# Altium footprint library KM_ALTIUM.PcbLib: 265 footprints (part 8 of 17)
Each footprint in its own frame and in the unit in brackets; x right, y up, seen from the top. Pads: shape width x height; smd on the part's side, far side on the other; paste and mask are expansions set on the pad; w line width, h text height; cw(c..) or ccw(c..) is an arc to the next point about the centre after c.
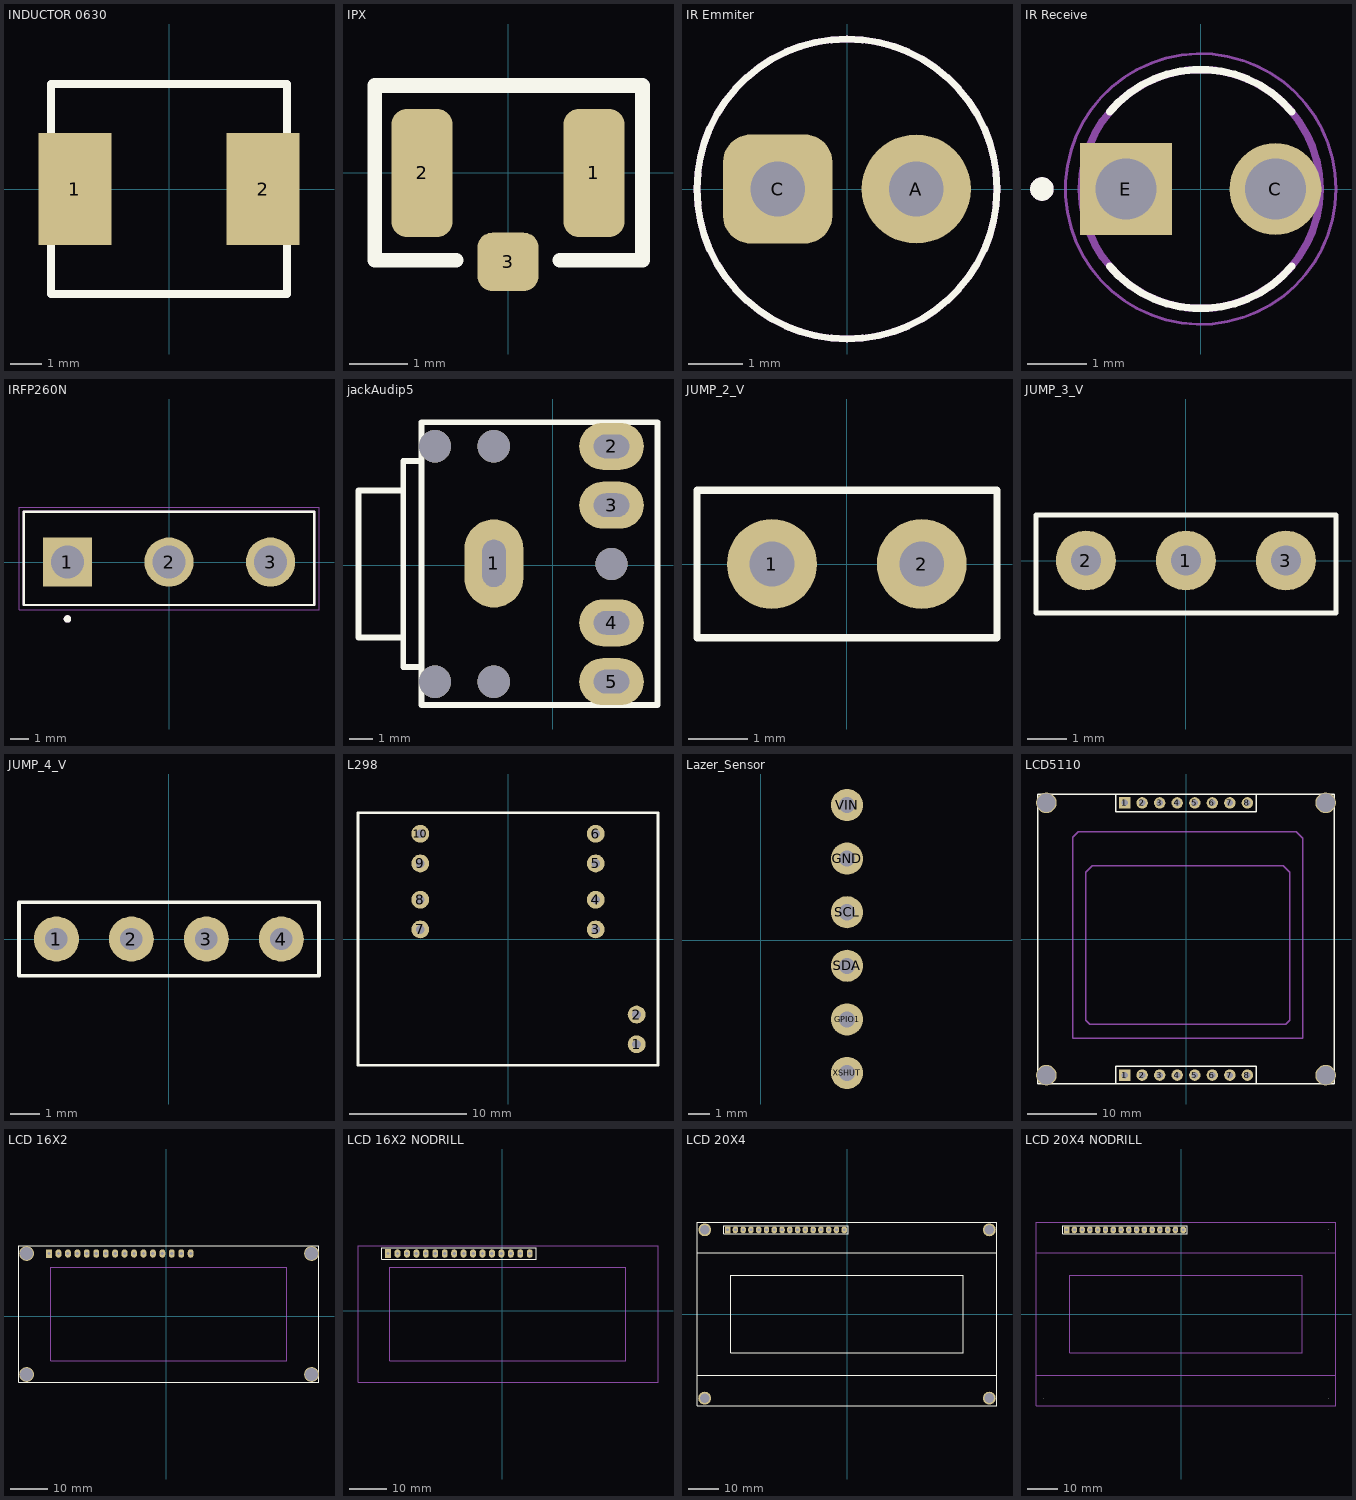
[diagram p7: the footprints below, top view; thin cyan lines are the x and y axes]

## INDUCTOR 0630 [mm]
pads (2):
  rect 2.35x3.6 smd: 1(-3.025,0) 2(3.025,0)
Top Overlay:
  lines w0.254: -3.8,-3.375 -3.8,3.375 3.8,3.375 3.8,-3.375 -3.8,-3.375
3D body "CIP0630.step": height 3.2, standoff 0, extent -3.8,-3.375 3.8,3.375

## IPX [mm]
pads (3):
  rrect50% 1.05x2.2 smd: 1(1.475,0) 2(-1.475,0)
  rrect50% 1.05x1 smd: 3(0,-1.525)
Top Overlay:
  lines w0.254: -0.889,-1.499 -2.286,-1.499 -2.286,1.5 2.311,1.5 2.311,-1.499 0.889,-1.499
3D body "User Library-20279-001.STEP": height 1.27, standoff 0.01, extent -1.5,-1.55 1.5,1.55

## IR Emmiter [mm] "3mm"
pads (2):
  round 2 hole 1 mask+0: A(1.27,0)
  rrect50% 2x2 hole 1 mask+0: C(-1.27,0)
Top Overlay:
  circle w0.127: c0,0 r2.75
Top Solder:
  circle w1: c1.27,0 r0.5
  circle w1: c-1.27,0 r0.5
Bottom Solder:
  circle w1: c1.27,0 r0.5
  circle w1: c-1.27,0 r0.5
Mechanical 13:
  circle w0.127: c0,0 r2.75
3D body "TSAL4400.STEP": height 6.1, standoff -28.8, extent -1.52,-1.587 1.52,1.587

## IR Receive [mm] "3mm"
pads (2):
  round 1.56 hole 1.04: C(1.27,0)
  rect 1.56x1.56 hole 1.04: E(-1.27,0)
Top Overlay:
  circle w0.2: c-2.7,0 r0.1
  lines w0.127: -1.55,-1.31 ccw(c0,-0.009) 1.55,-1.31 ; -1.55,1.31 cw(c0,0.009) 1.55,1.31
Mechanical 13:
  circle w0.2: c-2.7,0 r0.1
  circle w0.127: c0,0 r2.03
Mechanical 15:
  circle w0.05: c0,0 r2.3
3D body "TEFT4300--3DModel-STEP-269445.STEP": height 6.1, standoff -28.8, extent -1.473,-1.95 1.727,1.95

## IRFP260N [mm]
pads (3):
  rect 2.64x2.64 hole 1.76: 1(-5.45,0)
  round 2.64 hole 1.76: 2(0,0) 3(5.45,0)
Top Overlay:
  circle w0.2: c-5.45,-3.05 r0.1
  lines w0.127: -7.8,-2.3 7.8,-2.3 7.8,2.7 -7.8,2.7 -7.8,-2.3
Mechanical 13:
  circle w0.2: c-5.45,-3.05 r0.1
  lines w0.127: -7.8,-2.3 7.8,-2.3 7.8,2.7 -7.8,2.7 -7.8,-2.3
Mechanical 15:
  lines w0.05: -8.05,-2.55 8.05,-2.55 8.05,2.95 -8.05,2.95 -8.05,-2.55
3D body "step_temp.STEP": height 35.1, standoff 0, extent -7.8,-2.3 7.8,2.7

## jackAudip5 [mil]
pads (5):
  oval 100x150 hole 40 slot 80 at 90 deg: 1(-100,3)
  oval 110x80 hole 40 slot 60 at 0 deg: 2(100,202) 3(100,102) 4(100,-98) 5(100,-198)
via -100,202 diameter 55 hole 55
via -100,-198 diameter 55 hole 55
via 100,2 diameter 55 hole 55
via -200,202 diameter 55 hole 55
via -200,-198 diameter 55 hole 55
Top Overlay:
  lines w10: -330,127 -330,-123 -255,-123 ; -329,127 -256,127 -255,128 ; -225,176 -226,177 -254,177 -254,-173 -224,-173 ; -219,-238 178,-238 ; 178,242 178,-238 ; 178,-238 -223,-238 -223,243 178,243 178,-238
3D body "SW3dPS-CONNECTOR, PHONE JACK, STEREO, 3.5 MM, SEE-PLUS ST-3536-02HG.STEP": height 394.3, standoff -137.19, extent -353.56,-237 201.56,235.44

## JUMP_2_V [mil] "2.54"
pads (2):
  round 60 hole 30: 1(-50,0) 2(50,0)
Top Overlay:
  lines w4.92: -100,-49.21 -100,49.22 100.2,49.22 100.2,-49.21 -100,-49.21
3D body "1x2 Male Pin Header.STEP": height 414.96, standoff -118.11, extent -100,-49.21 100.2,49.22

## JUMP_3_V [mil] "2.54"
pads (3):
  round 60 hole 30: 1(0,0) 2(-100,0) 3(100,0)
Top Overlay:
  lines w4.92: -150,-52.71 150.2,-52.71 150.2,45.72 -150,45.72 -150,-52.71
3D body "1x3 Male Pin Header.STEP": height 414.96, standoff -118.11, extent -150,-52.71 150.2,45.72

## JUMP_4_V [mil] "2.54"
pads (4):
  round 60 hole 30: 1(-150,0) 2(-50,0) 3(50,0) 4(150,0)
Top Overlay:
  lines w4.92: -200,-49.21 200.2,-49.21 200.2,49.22 -200,49.22 -200,-49.21
3D body "1x4 Male Pin Header.STEP": height 414.96, standoff -118.11, extent -200,-49.21 200.2,49.22

## L298 [mil] "Module"
pads (10):
  round 60 hole 30: 1(433.07,-354.33) 2(433.07,-254.33) 3(295.28,32.28) 4(295.28,132.28) 5(295.28,254.33) 6(295.28,354.33) 7(-295.28,32.28) 8(-295.28,132.28) 9(-295.28,254.33) 10(-295.28,354.33)
Top Overlay:
  lines w10: -505,-425 505,-425 505,425 480,425 -505,425 -505,-425
3D body "MX1616 stepper driver .STEP": height 295.28, standoff -3.94, extent -492.13,-413.38 492.12,413.39

## Lazer_Sensor [mil] "VL53L0X (ToF-F) 940nm GY-VL53L0XV2 I2C"
pads (6):
  round 60 hole 30: GND(161.42,151.97) GPIO1(161.42,-148.03) SCL(161.42,51.97) SDA(161.42,-48.03) VIN(161.42,251.97) XSHUT(161.42,-248.03)
3D body "vl53l0x.stp": height 452.76, standoff 19.69, extent -98.43,-480.31 39.37,492.13
3D body "PinHeader_6X1_right.stp": height 190.94, standoff -142.52, extent -111.73,-298.03 171.73,301.97

## LCD5110 [mil]
pads (20):
  rect 65x65 hole 35.43: 1(-350,-777) 1(-350,777)
  round 65 hole 35.43: 2(-250,-777) 2(-250,777) 3(-150,-777) 3(-150,777) 4(-50,-777) 4(-50,777) 5(50,-777) 5(50,777) 6(150,-777) 6(150,777) 7(250,-777) 7(250,777) 8(350,-777) 8(350,777)
  round 118.11 hole 106.3: ""(-797,-777.01) ""(-797,777.01) ""(797,-777.01) ""(797,777.01)
Top Overlay:
  lines w7.87: -400,-827 400,-827 400,-727 -400,-727 -400,-827 ; -400,727 -400,827 400,827 400,727 -400,727
  lines w8: -846.46,-826.77 846.23,-826.77 ; -846.46,-826.32 -846.46,826.77 846.46,826.77 ; 0,-726 1,-727 ; 0,828 1,827 ; 846.46,-826.77 846.46,826.32
Mechanical 1:
  lines w8: -646,-567 665,-567 665,575 629,611 -615,611 -646,580 -646,-567
Mechanical 3:
  lines w8: -572,-464 -549,-487 568,-487 591,-464 591,381 554,418 -534,418 -572,380 -572,-464
3D body "User Library-LCD5110R-1RED.STEP": height 180.71, standoff -51.57, extent -885.83,-909.83 885.83,861.82

## LCD 16X2 [mil]
pads (20):
  rect 62x90 hole 36: 1(-1242,666)
  oval 62x90 hole 36: 2(-1142,666) 3(-1042,666) 4(-942,666) 5(-842,666) 6(-742,666) 7(-642,666) 8(-542,666) 9(-442,666) 10(-342,666) 11(-242,666) 12(-142,666) 13(-42,666) 14(58,666) 15(158,666) 16(258,666)
  round 157.48 hole 137.8: "Hole 0"(-1479.24,-615) "Hole 0"(-1479.24,666) "Hole 0"(1538.27,-615) "Hole 0"(1538.27,666)
Top Overlay:
  lines w7: -1560,-697 -1560,748 1616,748 1616,-697 -1560,-697
Mechanical 13:
  lines w10: -1222,-470 -1222,521 1277,521 1277,-470 -1222,-470
3D body "LCD module 16 X 2 backlight.STEP": height 414, standoff -106, extent -1556.65,-694 1612.65,743.01

## LCD 16X2 NODRILL [mil]
pads (16):
  rect 62x90 hole 36: 1(-1207,607)
  oval 62x90 hole 36: 2(-1107,607) 3(-1007,607) 4(-907,607) 5(-807,607) 6(-707,607) 7(-607,607) 8(-507,607) 9(-407,607) 10(-307,607) 11(-207,607) 12(-107,607) 13(-7,607) 14(93,607) 15(193,607) 16(293,607)
Top Overlay:
  lines w8: -1275,547 -1275,667 364,667 364,547 -1275,547
Mechanical 1:
  lines w10: -1187,-529 -1187,462 1312,462 1312,-529 -1187,-529
Mechanical 13:
  lines w10: -1525,-756 -1525,689 1651,689 1651,-756 -1525,-756
3D body "LCD module 16 X 2 backlight.STEP": height 414, standoff -106, extent -1521.65,-753 1647.65,684.01

## LCD 20X4 [mm]
height 0.7
pads (20):
  rect 1.778x2.286 hole 0.9: 1(-39,27.5)
  oval 1.778x2.286 hole 0.9: 2(-36.46,27.5) 3(-33.92,27.5) 4(-31.38,27.5) 5(-28.84,27.5) 6(-26.3,27.5) 7(-23.76,27.5) 8(-21.22,27.5) 9(-18.68,27.5) 10(-16.14,27.5) 11(-13.6,27.5) 12(-11.06,27.5) 13(-8.52,27.5) 14(-5.98,27.5) 15(-3.44,27.5) 16(-0.9,27.5)
  round 4.2 hole 3.2: ""(-46.5,-27.493) ""(-46.457,27.5) ""(46.5,-27.483) ""(46.5,27.493)
Top Overlay:
  lines w0.2: -40.27,26.23 0.37,26.23 0.37,28.77 -38.365,28.77 -40.27,28.77 -40.27,26.23
  lines w0.203: -49,-20.015 -48.985,-20 0,-20 48.985,-20 49,-20.015 ; -49,20.015 -48.985,20 0,20 48.99,20 49,19.99 ; -46.507,-27.5 -46.5,-27.493 ; -38,12.6 0,12.6 37.998,12.6 38,12.602 38,0 38,-12.598 37.998,-12.6 0,-12.6 -38,-12.6 -38,-12.576 -38,0 -38,12.573 -37.973,12.6 ; 46.483,-27.5 46.5,-27.483 ; 46.5,27.493 46.507,27.5 ; -49,-30 -49,0 -49,30 0,30 49,30 49,0 49,-30 0,-30 -49,-30
3D body "User Library-LCD20_4.STEP": height 10.6, standoff -3.2, extent -49,-30 49,30

## LCD 20X4 NODRILL [mil]
pads (16):
  rect 70x90 hole 35.43: 1(-1473.43,1087.68)
  oval 70x90 hole 35.43: 2(-1373.43,1087.68) 3(-1273.43,1087.68) 4(-1173.43,1087.68) 5(-1073.43,1087.68) 6(-973.43,1087.68) 7(-873.43,1087.68) 8(-773.43,1087.68) 9(-673.43,1087.68) 10(-573.43,1087.68) 11(-473.43,1087.68) 12(-373.43,1087.68) 13(-273.43,1087.68) 14(-173.43,1087.68) 15(-73.43,1087.68) 16(26.57,1087.68)
Top Overlay:
  lines w7.87: -1523.43,1037.68 -1523.43,1137.68 -1448.43,1137.68 76.57,1137.68 76.57,1037.68 -1523.43,1037.68
  lines w8: -1769,-1077.68 -1768.71,-1077.39 ; 1892.03,-1077.68 1892.71,-1077 ; 1892.71,1087.39 1893,1087.68
Mechanical 1:
  lines w8: -1867.13,-783 -1866.54,-782.4 62,-782.4 1990.54,-782.4 1991.13,-783 ; -1867.13,793 -1866.54,792.4 62,792.4 1990.73,792.4 1991.13,792 ; -1434.06,501.06 62,501.06 1558,501.06 1558.06,501.13 1558.06,5 1558.06,-491 1558,-491.06 62,-491.06 -1434.06,-491.06 -1434.06,-490.13 -1434.06,5 -1434.06,500 -1433,501.06 ; -1867.13,-1176.1 62,-1176.1 1991.13,-1176.1 1991.13,5 1991.13,1186.1 62,1186.1 -1867.13,1186.1 -1867.13,5 -1867.13,-1176.1
3D body "User Library-LCD20_4.STEP": height 417.32, standoff -125.98, extent -1867.13,-1176.1 1991.13,1186.1